# Altium schematic symbol library BAV20WS_RRG.SchLib: 1 symbol
Pins are listed as number, name and electrical type; pins without a type are passive.

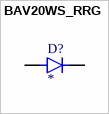
[diagram p0: symbol BAV20WS_RRG]

## BAV20WS_RRG
designator D?
MF: {'manufacturer': u'Taiwan Semiconductor'}; MP: BAV20WS_RRG; Package: None; Price: None; Value: *; Availability: Unavailable
footprint DIO_BAV20WS_RRG
pins: A, C K